# Altium footprint library 1.10-电容.PcbLib: 193 footprints (part 13 of 13)
Each footprint in its own frame and in the unit in brackets; x right, y up, seen from the top. Pads: shape width x height; smd on the part's side, far side on the other; paste and mask are expansions set on the pad; w line width, h text height; cw(c..) or ccw(c..) is an arc to the next point about the centre after c.
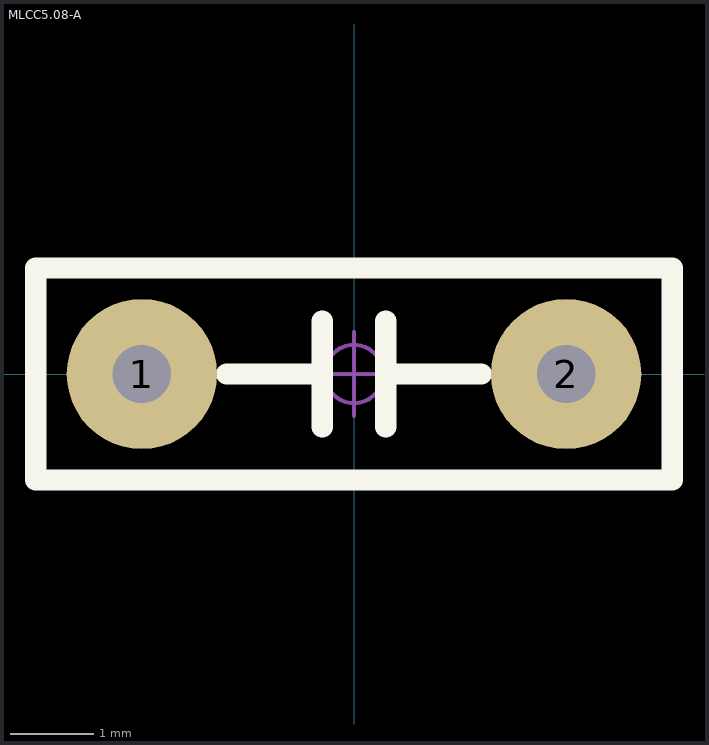
[diagram p12: the footprint, top view; thin cyan lines are the x and y axes]

## MLCC5.08-A [mm] "独石电容，脚距5.08mm            淘宝ID:黄晶宝石"
pads (2):
  round 1.8 hole 0.7: 1(-2.54,0) 2(2.54,0)
Top Overlay:
  lines w0.254: -1.524,0 -0.381,0 ; -0.381,-0.635 -0.381,0.635 ; 0.381,-0.635 0.381,0.635 ; 0.381,0 1.524,0 ; -3.81,-1.27 3.81,-1.27 3.81,1.27 -3.81,1.27 -3.81,-1.27
Mechanical 15:
  circle w0.05: c0,0 r0.35
  lines w0.05: -0.5,0 0.5,0 ; 0,-0.5 0,0.5
3D body "MLCC5.08-A.STEP": height 3.71, standoff -2.61, extent -2.79,-1.003 2.79,1.003